# Altium schematic symbol library Schlib1.SchLib: 9 symbols
Pins are listed as number, name and electrical type; pins without a type are passive.

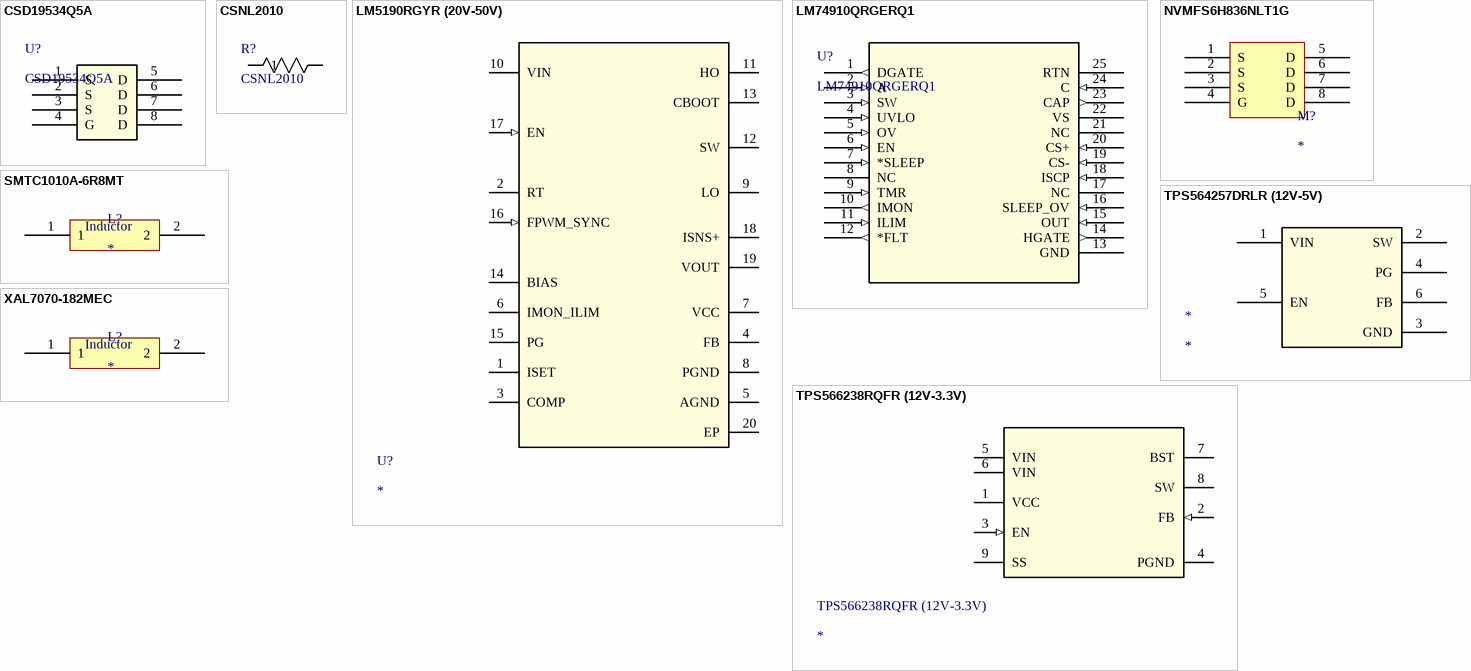
[diagram p0: symbols CSD19534Q5A to XAL7070-182MEC]

## CSD19534Q5A
designator U?
100-V, N channel NexFETâ„¢ power MOSFET, single SON 5 mm x 6 mm, 15.1 mOhm 8-VSONP -55 to 150; Manufacturer_Name: Texas Instruments; Copyright: Copyright (C) 2026 Ultra Librarian. All rights reserved.; Manufacturer_Part_Number: CSD19534Q5A; RefDes: RefDes; Type: Type
footprint DQJ8
pins: 1 S, 2 S, 3 S, 4 G, 5 D, 6 D, 7 D, 8 D

## CSNL2010
designator R?
Manufacturer_Name: Susumu; Manufacturer_Part_Number: PRL1632-R005-F-T1; Copyright: Copyright (C) 2025 Ultra Librarian. All rights reserved.
footprint CSNL2010
pins: 1, 2

## LM5190RGYR (20V-50V)
designator U?
footprint LM5190RGYR
pins: 1 ISET, 2 RT, 3 COMP, 4 FB, 5 AGND (power), 6 IMON_ILIM, 7 VCC (power), 8 PGND (power), 9 LO, 10 VIN (power), 11 HO, 12 SW (power), 13 CBOOT (power), 14 BIAS (power), 15 PG (oc), 16 FPWM_SYNC (in), 17 EN (in), 18 ISNS+, 19 VOUT, 20 EP

## LM74910QRGERQ1
designator U?
Automotive ideal diode with circuit breaker, 200-kHz ACS and under- and overvoltage protection 24-VQFN -40 to 125; Manufacturer_Name: Texas Instruments; Copyright: Copyright (C) 2025 Ultra Librarian. All rights reserved.; Manufacturer_Part_Number: LM74910QRGERQ1; RefDes: RefDes; Type: Type
footprint VQFN24_RGE-T_TEX-L
pins: 1 DGATE (out), 2 A (in), 3 SW (in), 4 UVLO (in), 5 OV (in), 6 EN (in), 7 *SLEEP (in), 8 NC, 9 TMR (in), 10 IMON (out), 11 ILIM (in), 12 *FLT (out), 13 GND (power), 14 HGATE (out), 15 OUT (in), 16 SLEEP_OV (in), 17 NC, 18 ISCP (in), 19 CS- (in), 20 CS+ (in), 21 NC, 22 VS (power), 23 CAP (out), 24 C (in), 25 RTN (power)

## NVMFS6H836NLT1G
designator M?
footprint NVMFS6H836NLT1G (Low-sid MOSFT)
pins: 1 S, 2 S, 3 S, 4 G, 5 D, 6 D, 7 D, 8 D

## SMTC1010A-6R8MT
designator L?
footprint SMTC1010A-6R8MT
pins: 1, 2
text: Inductor

## TPS564257DRLR (12V-5V)
designator *
pins: 1 VIN (power), 2 SW (power), 3 GND (power), 4 PG, 5 EN, 6 FB

## TPS566238RQFR (12V-3.3V)
designator TPS566238RQFR (12V-3.3V)
footprint RQF0009A
pins: 1 VCC (power), 2 FB (in), 3 EN (in), 4 PGND (power), 5 VIN (power), 6 VIN (power), 7 BST (power), 8 SW (power), 9 SS

## XAL7070-182MEC
designator L?
footprint XAL7070-182MEC
pins: 1, 2
text: Inductor